# Altium integrated library Huan_basic.IntLib: 113 symbols
Pins are listed as number, name and electrical type; pins without a type are passive.

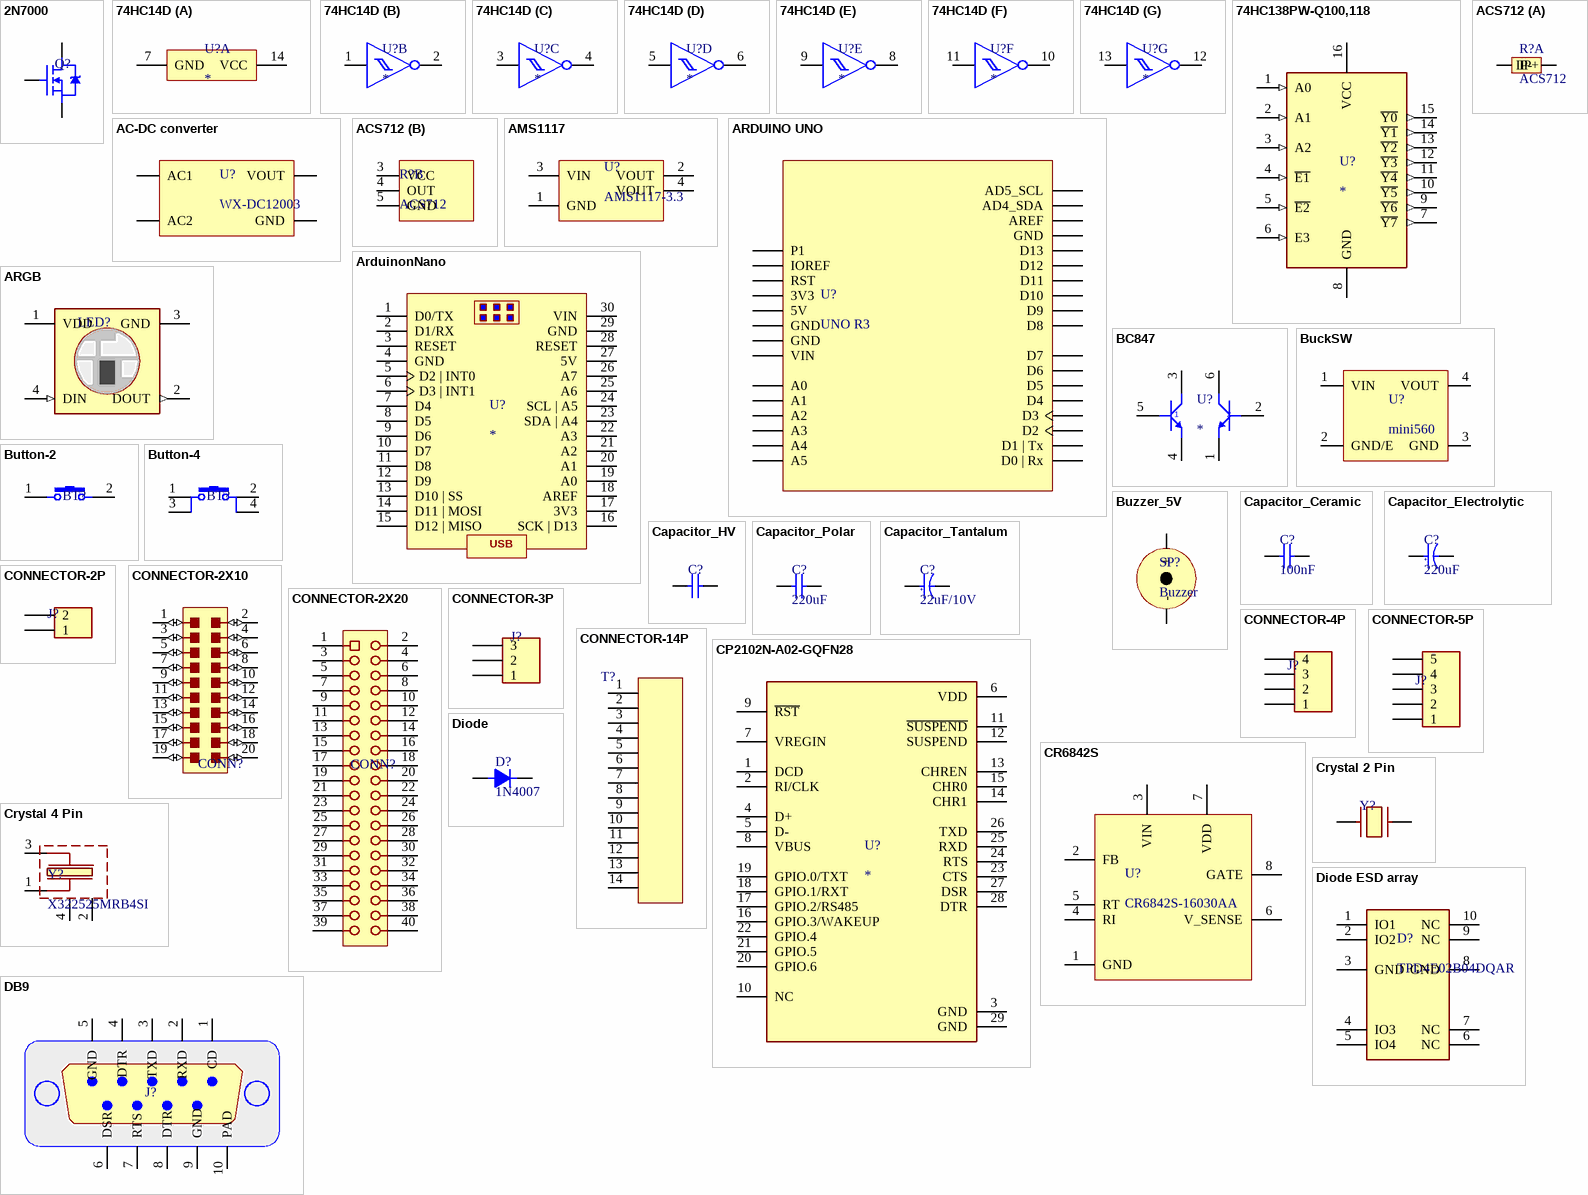
[diagram p0: symbols 2N7000 to Diode ESD array]

## 2N7000
designator Q?, comment Mosfet N Signal  (value not drawn)
footprint SOT-23
pins: 1 G, 2 D, 3 S

## 74HC14D
designator U?
Inverter IC 6 Channel Schmitt Trigger 14-SOIC; MF: Toshiba; MP: 74HC14D; SnapEDA_Link: https://www.snapeda.com/parts/74HC14D/Toshiba+Semiconductor+and+Storage/view-part/?ref=snap; Availability: In Stock; Price: None; Package: SO14-14 Nexperia USA Inc.; Purchase-URL: https://pricing.snapeda.com/search/part/74HC14D/?ref=eda; Check_prices: https://www.snapeda.com/parts/74HC14D/Toshiba+Semiconductor+and+Storage/view-part/?ref=eda; Value: *
footprint SO14
part A pins: 7 GND, 14 VCC (power)
part B pins: 1 1A (power), 2 1Y (power)
part C pins: 3 2A (power), 4 2Y (power)
part D pins: 5 3A (power), 6 3Y (power)
part E pins: 8 4Y (power), 9 4A (power)
part F pins: 10 5Y (power), 11 5A (power)
part G pins: 12 6Y (power), 13 6A (power)

## 74HC138PW-Q100,118
designator U?
Decoder/Demultiplexer 1 x 3:8 16-TSSOP; MF: Nexperia USA; MP: 74HC138PW-Q100,118; SnapEDA_Link: https://www.snapeda.com/parts/74HC138PW-Q100,118/Nexperia/view-part/?ref=snap; Package: TSSOP16-16 Nexperia USA Inc.; Value: *; Check_prices: https://www.snapeda.com/parts/74HC138PW-Q100,118/Nexperia/view-part/?ref=eda
footprint TSSOP-20
pins: 1 A0 (in), 2 A1 (in), 3 A2 (in), 4 ~{E1} (in), 5 ~{E2} (in), 6 E3 (in), 7 ~{Y7} (out), 8 GND (power), 9 ~{Y6} (out), 10 ~{Y5} (out), 11 ~{Y4} (out), 12 ~{Y3} (out), 13 ~{Y2} (out), 14 ~{Y1} (out), 15 ~{Y0} (out), 16 VCC (power)

## AC-DC converter
designator U?, comment WX-DC12003
footprint WX-DC12003
pins: 1 AC1, 2 AC2, 3 GND, 4 VOUT

## ACS712
designator R?
footprint ACS712
part A pins: 1 IP+, 2 IP-
part B pins: 3 VCC, 4 OUT, 5 GND

## AMS1117
designator U?, comment AMS1117-3.3
footprint SOT223
pins: 1 GND, 2 VOUT, 3 VIN, 4 VOUT

## ARDUINO UNO
designator U?, comment UNO R3
Microcontroller board based on the ATmega328P.; MF: Arduino; MP: ARDUINO UNO REV3; SnapEDA_Link: https://www.snapeda.com/parts/ARDUINO%20UNO%20REV3/Arduino/view-part/?ref=snap; Package: Non-Standard Arduino; Value: *; Check_prices: https://www.snapeda.com/parts/ARDUINO%20UNO%20REV3/Arduino/view-part/?ref=eda
footprint ARDUINO_ARDUINO_UNO_REV3
pins: 3V3 (power), 5V (power), A0 (power), A1 (power), A2 (power), A3 (power), A4 (power), A4_SDA AD4_SDA (power), A5 (power), A5_SCL AD5_SCL (power), AREF (power), D0 D0 | Rx (power), D1 D1 | Tx (power), D2 (power), D3 (power), D4 (power), D5 (power), D6 (power), D7 (power), D8 (power), D9 (power), D10 (power), D11 (power), D12 (power), D13 (power), GND_1 GND (power), GND_2 GND (power), GND_3 GND (power), IOREF (power), P1 (power), RST (power), VIN (power)

## ArduinonNano
designator U?
Small, complete, and breadboard-friendly board based on the ATmega328 (Arduino Nano 3.x).; MP: A000005; Check_prices: https://www.snapeda.com/parts/A000005/Arduino/view-part/?ref=eda; Value: *; Availability: In Stock; Price: None; Package: Non-Standard Arduino; SnapEDA_Link: https://www.snapeda.com/parts/A000005/Arduino/view-part/?ref=snap; Purchase-URL: https://pricing.snapeda.com/search/part/A000005/?ref=eda; MF: Arduino
footprint ARDUINO-NANO
pins: 1 D0/TX (power), 2 D1/RX (power), 3 RESET (power), 4 GND (power), 5 D2 | INT0 (power), 6 D3 | INT1 (oc), 7 D4 (power), 8 D5 (oc), 9 D6 (oc), 10 D7 (power), 11 D8 (power), 12 D9 (oc), 13 D10 | SS (oc), 14 D11 | MOSI (oc), 15 D12 | MISO (power), 16 SCK | D13 (power), 17 3V3 (power), 18 AREF (power), 19 A0 (power), 20 A1 (power), 21 A2 (power), 22 A3 (power), 23 SDA | A4 (power), 24 SCL | A5 (power), 25 A6 (power), 26 A7 (power), 27 5V (power), 28 RESET (power), 29 GND (power), 30 VIN (power)
text: USB

## ARGB
designator LED?  (value not drawn)
5050 symphony LED SMD; MF: Xinglight; MP: XL-5050RGBC-WS2812B; SnapEDA_Link: https://www.snapeda.com/parts/XL-5050RGBC-WS2812B/Xinglight/view-part/?ref=snap; Package: Package; Value: *; Check_prices: https://www.snapeda.com/parts/XL-5050RGBC-WS2812B/Xinglight/view-part/?ref=eda
footprint WS2812-5050
footprint sk6805
pins: 1 VDD (power), 2 DOUT (out), 3 GND (power), 4 DIN (in)

## BC847
designator U?
Bipolar (BJT) Transistor Array 2 NPN (Dual) 45V 100mA 100MHz 380mW Surface Mount SC-88/SC70-6/SOT-363; MF: onsemi; MP: BC847BDW1T1G; SnapEDA_Link: https://www.snapeda.com/parts/BC847BDW1T1G/Onsemi/view-part/?ref=snap; Package: SC-88-6 ON Semiconductor; Value: *; Check_prices: https://www.snapeda.com/parts/BC847BDW1T1G/Onsemi/view-part/?ref=eda
footprint SOT-363
pins: 1, 2, 3, 4, 5, 6

## BuckSW
designator U?, comment mini560
footprint BUCK-20V-3A
footprint mini560
pins: 1 VIN, 2 GND/E, 3 GND, 4 VOUT

## Button-2
designator BT?
footprint SW_B3U-1000PM
pins: 1, 2

## Button-4
designator BT?
footprint BUTTON-12X12MM
footprint BUTTON 6X6 SMD
pins: 1, 2, 3, 4

## Buzzer_5V
designator SP?, comment Buzzer
footprint Buzzer
pins: 1 +, 2 -

## Capacitor_Ceramic
designator C?, comment 100nF
footprint C0603
footprint C1206
footprint C0805
footprint C1812
footprint C0402
footprint C1210
pins: 1, 2

## Capacitor_Electrolytic
designator C?, comment 220uF
footprint CAP-TH-6.3MM
footprint CAP-TH-8MM
footprint CAP-TH-10MM
footprint CAP-SMD-6.3MM
footprint CAP-SMD-8MM
footprint CAP-SMD-10MM
footprint CAP-TH-16MM
footprint C2917
pins: 1, 2
text: +

## Capacitor_HV
designator C?  (value not drawn)
footprint CAP-HV
pins: 1, 2

## Capacitor_Polar
designator C?, comment 220uF
footprint cbb21
pins: 1, 2

## Capacitor_Tantalum
designator C?, comment 22uF/10V
MF: KYOCERA AVX; MP: TAJA106K016RNJ; SnapEDA_Link: https://www.snapeda.com/parts/TAJA106K016RNJ/Kyocera/view-part/?ref=snap; Package: Package; Value: *; Check_prices: https://www.snapeda.com/parts/TAJA106K016RNJ/Kyocera/view-part/?ref=eda
footprint C1206P
footprint C2917
pins: 1, 2
text: +

## CONNECTOR-2P
designator J?
footprint KF5.08-2P
footprint TERMINAL-7.62-2
footprint TERMINAL-5.08-2
footprint KF762MM
footprint JST_S2B-PH-SM4-TB(LF)(SN)
pins: 1, 2

## CONNECTOR-2X10
designator CONN?
footprint 2.54 2x10
pins: 1 (io), 2 (io), 3 (io), 4 (io), 5 (io), 6 (io), 7 (io), 8 (io), 9 (io), 10 (io), 11 (io), 12 (io), 13 (io), 14 (io), 15 (io), 16 (io), 17 (io), 18 (io), 19 (io), 20 (io)

## CONNECTOR-2X20
designator CONN?
footprint 2.54 2x20
pins: 1 (power), 2 (power), 3 (power), 4 (power), 5 (power), 6 (power), 7 (power), 8 (power), 9 (power), 10 (power), 11 (power), 12 (power), 13 (power), 14 (power), 15 (power), 16 (power), 17 (power), 18 (power), 19 (power), 20 (power), 21 (power), 22 (power), 23 (power), 24 (power), 25 (power), 26 (power), 27 (power), 28 (power), 29 (power), 30 (power), 31 (power), 32 (power), 33 (power), 34 (power), 35 (power), 36 (power), 37 (power), 38 (power), 39 (power), 40 (power)

## CONNECTOR-3P
designator J?  (value not drawn)
footprint KF5.08-3p
footprint XH-2.54-3-V
footprint ED5.08-3P
footprint TERMINAL-7.62-3
pins: 1, 2, 3

## CONNECTOR-4P
designator J?
footprint XH-2.54-4-R
footprint CH-3.96-4-V
footprint XH-2.54-4P
pins: 1, 2, 3, 4

## CONNECTOR-5P
designator J?
footprint XH-2.54-5-R
footprint HB9500
pins: 1, 2, 3, 4, 5

## CONNECTOR-14P
designator T?
footprint DG141-14P
pins: 1 (power), 2 (power), 3 (power), 4 (power), 5 (power), 6 (power), 7 (power), 8 (power), 9 (power), 10 (power), 11 (power), 12 (power), 13 (power), 14 (power)

## CP2102N-A02-GQFN28
designator U?
USB TO UART BRIDGE, -40 TO 85DEG C; Bridge Type:USB to UART; Supply Voltage Min:3V; Supply Voltage Max:3.6V; Interface Case Style:QFN; No. of Pins:28Pins; Operating Temperature Min:-40Â°C; Operating Temperature Max:85Â°C; Product Range:-; Automotive Quali; MF: Silicon Labs; MP: CP2102NA02GQFN28; SnapEDA_Link: https://www.snapeda.com/parts/CP2102NA02GQFN28/Silicon+Labs/view-part/?ref=snap; Package: None; Value: *; Check_prices: https://www.snapeda.com/parts/CP2102NA02GQFN28/Silicon+Labs/view-part/?ref=eda
footprint QFN-28
pins: 1 DCD (power), 2 RI/CLK (power), 3 GND (power), 4 D+ (power), 5 D- (power), 6 VDD (power), 7 VREGIN (power), 8 VBUS (power), 9 ~{RST} (power), 10 NC (power), 11 ~{SUSPEND} (power), 12 SUSPEND (power), 13 CHREN (power), 14 CHR1 (power), 15 CHR0 (power), 16 GPIO.3/WAKEUP (power), 17 GPIO.2/RS485 (power), 18 GPIO.1/RXT (power), 19 GPIO.0/TXT (power), 20 GPIO.6 (power), 21 GPIO.5 (power), 22 GPIO.4 (power), 23 CTS (power), 24 RTS (power), 25 RXD (power), 26 TXD (power), 27 DSR (power), 28 DTR (power), 29 GND (power)

## CR6842S
designator U?, comment CR6842S-16030AA
footprint SOP-8
pins: 1 GND, 2 FB, 3 VIN, 4 RI, 5 RT, 6 V_SENSE, 7 VDD, 8 GATE

## Crystal 2 Pin
designator Y?, comment 32.768kHz  (value not drawn)
LOW FREQUENCY CRYSTAL; MF: Micro Crystal; MP: CM7V-T1A-LOW-ESR-32.768KHZ-12.5PF-20-TA-QC; Package: SMD-2 Micro Crystal; Value: *; Check_prices: https://www.snapeda.com/parts/CM7V-T1A-LOW-ESR-32.768KHZ-12.5PF-20-TA-QC/Micro+Crystal/view-part/?ref=eda; SnapEDA_Link: https://www.snapeda.com/parts/CM7V-T1A-LOW-ESR-32.768KHZ-12.5PF-20-TA-QC/Micro+Crystal/view-part/?ref=snap; Availability: In Stock; Purchase-URL: https://pricing.snapeda.com/search/part/CM7V-T1A-LOW-ESR-32.768KHZ-12.5PF-20-TA-QC/?ref=eda; Price: None
footprint XTAL 2P 3215
pins: 1, 2

## Crystal 4 Pin
designator Y?, comment X322525MRB4SI
25 MHz ±10ppm Crystal 18pF 40 Ohms 4-SMD, No Lead; MP: TSX-3225 25.0000MF10P-C0; MF: EPSON; Purchase-URL: https://pricing.snapeda.com/search/part/TSX-3225 25.0000MF10P-C0/?ref=eda; Package: SMD-4 EPSON; Value: *; Availability: In Stock; Price: None; SnapEDA_Link: https://www.snapeda.com/parts/TSX-3225%2025.0000MF10P-C0/EPSON/view-part/?ref=snap; Check_prices: https://www.snapeda.com/parts/TSX-3225%2025.0000MF10P-C0/EPSON/view-part/?ref=eda
footprint XTAL 4P 3225
pins: 1, 2 GND (power), 3 2, 4 GND (power)

## DB9
designator J?, comment DB9 connector  (value not drawn)
footprint DB9
pins: 1 CD, 2 RXD, 3 TXD, 4 DTR, 5 GND, 6 DSR, 7 RTS, 8 DTR, 9 GND, 10 PAD

## Diode
designator D?, comment 1N4007
footprint SOD-123F
footprint LL-34(MiniMELF)
footprint DO-214AC(SMA)
footprint DO-214AB(SMC)
footprint DO-41-plastic_Vertical
footprint R-6
footprint DO-2A
footprint SOD-123
footprint SOD-323
footprint DO-41-plastic
pins: 1 A, 2 K

## Diode ESD array
designator D?, comment TPD4E02B04DQAR
4-channel ESD protection diode for USB Type-C and HDMI 2.0 10-USON -40 to 125; MF: Texas Instruments; Value: *; MP: TPD4E02B04DQAR; Package: USON-10 Texas Instruments; Purchase-URL: https://pricing.snapeda.com/search/part/TPD4E02B04DQAR/?ref=eda; SnapEDA_Link: https://www.snapeda.com/parts/TPD4E02B04DQAR/Texas%20Instruments/view-part/576424/?ref=snap; Check_prices: https://www.snapeda.com/parts/TPD4E02B04DQAR/Texas%20Instruments/view-part/576424/?ref=eda; Digi-Key_Part_Number: 296-43875-1-ND
footprint USON-10
pins: 1 IO1 (power), 2 IO2 (power), 3 GND (power), 4 IO3 (power), 5 IO4 (power), 6 NC, 7 NC, 8 GND (power), 9 NC, 10 NC

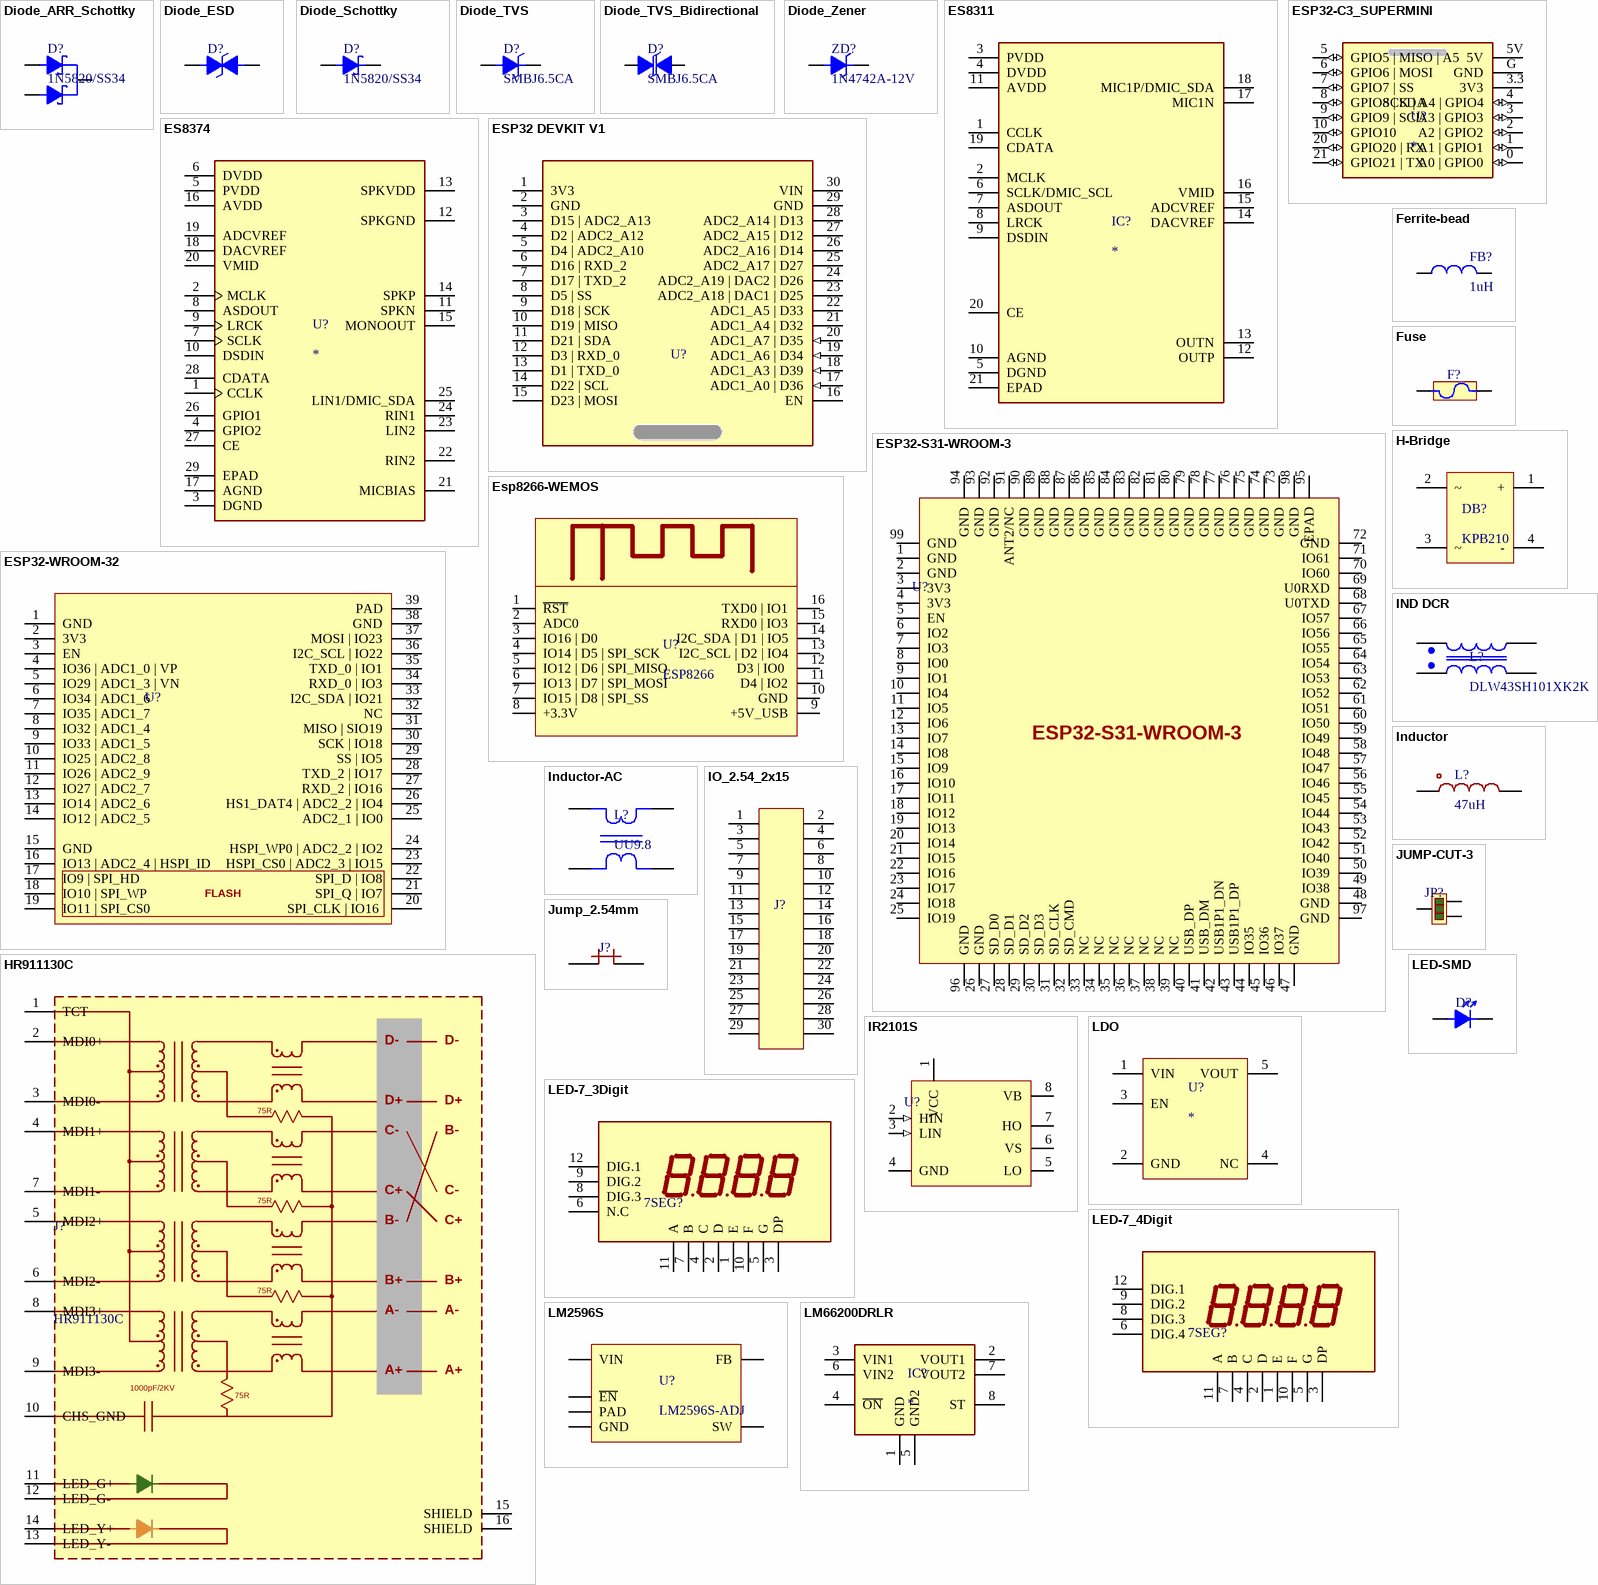
[diagram p1: symbols Diode_ARR_Schottky to LM66200DRLR]

## Diode_ARR_Schottky
designator D?, comment 1N5820/SS34
footprint TO-252-2
pins: 1 A, 2 K, 3 A

## Diode_ESD
designator D?
footprint SOD-523
pins: 1 A, 2 K

## Diode_Schottky
designator D?, comment 1N5820/SS34
footprint SOD-123F
footprint DO-214AC(SMA)
footprint DO-214AB(SMC)
footprint DO-214AA(SMB)
pins: 1 A, 2 K

## Diode_TVS
designator D?, comment SMBJ6.5CA
footprint DO-214AC(SMA)
footprint DO-214AB(SMC)
footprint SOD-323
footprint SOD-123
footprint SOD-523
footprint DO-214AA(SMB)
pins: 1 A, 2 K

## Diode_TVS_Bidirectional
designator D?, comment SMBJ6.5CA
footprint DO-214AC(SMA)
footprint DO-214AB(SMC)
footprint SOD-323
footprint DO-214AA(SMB)
pins: 1 A, 2 K

## Diode_Zener
designator ZD?, comment 1N4742A-12V
footprint SOD-123F
footprint LL-34(MiniMELF)
footprint DO-41-glass
pins: 1 A, 2 K

## ES8311
designator IC?
Low Power Mono Audio CODEC; MF: Everest Semiconductor; MP: ES8311; SnapEDA_Link: https://www.snapeda.com/parts/ES8311/Everest+Semiconductor/view-part/?ref=snap; Package: Package; Value: *; Check_prices: https://www.snapeda.com/parts/ES8311/Everest+Semiconductor/view-part/?ref=eda
footprint QFN-20
pins: 1 CCLK (power), 2 MCLK (power), 3 PVDD (power), 4 DVDD (power), 5 DGND (power), 6 SCLK/DMIC_SCL (power), 7 ASDOUT (power), 8 LRCK (power), 9 DSDIN (power), 10 AGND (power), 11 AVDD (power), 12 OUTP (power), 13 OUTN (power), 14 DACVREF (power), 15 ADCVREF (power), 16 VMID (power), 17 MIC1N (power), 18 MIC1P/DMIC_SDA (power), 19 CDATA (power), 20 CE (power), 21 EPAD (power)

## ES8374
designator U?
Low Power Mono Audio CODEC. 24-bit, 8 to 96 kHz sampling frequency, 95 dB signal to noise ratio.; MF: Everest Semiconductor; MP: ES8374; SnapEDA_Link: https://www.snapeda.com/parts/ES8374/Everest+Semiconductor/view-part/?ref=snap; Package: None; Value: *; Check_prices: https://www.snapeda.com/parts/ES8374/Everest+Semiconductor/view-part/?ref=eda
footprint QFN-28
pins: 1 CCLK (power), 2 MCLK (power), 3 DGND (power), 4 GPIO2 (power), 5 PVDD (power), 6 DVDD (power), 7 SCLK (power), 8 ASDOUT (power), 9 LRCK (power), 10 DSDIN (power), 11 SPKN (power), 12 SPKGND (power), 13 SPKVDD (power), 14 SPKP (power), 15 MONOOUT (power), 16 AVDD (power), 17 AGND (power), 18 DACVREF (power), 19 ADCVREF (power), 20 VMID (power), 21 MICBIAS (power), 22 RIN2 (power), 23 LIN2 (power), 24 RIN1 (power), 25 LIN1/DMIC_SDA (power), 26 GPIO1 (power), 27 CE (power), 28 CDATA (power), 29 EPAD (power)

## ESP32 DEVKIT V1
designator U?  (value not drawn)
The DOIT ESP32 DevKit V1 is probably the most famous development board based on the equally popular ESP32 Wi-Fi SoC from Espressif. In fact, the DevKit V1 is more popular than any official board from Espressif.
footprint ESP32 DEVKIT V1
pins: 1 3V3, 2 GND, 3 D15 | ADC2_A13, 4 D2 | ADC2_A12, 5 D4 | ADC2_A10, 6 D16 | RXD_2, 7 D17 | TXD_2, 8 D5 | SS, 9 D18 | SCK, 10 D19 | MISO, 11 D21 | SDA, 12 D3 | RXD_0, 13 D1 | TXD_0, 14 D22 | SCL, 15 D23 | MOSI, 16 EN, 17 ADC1_A0 | D36 (in), 18 ADC1_A3 | D39 (in), 19 ADC1_A6 | D34 (in), 20 ADC1_A7 | D35 (in), 21 ADC1_A4 | D32, 22 ADC1_A5 | D33, 23 ADC2_A18 | DAC1 | D25, 24 ADC2_A19 | DAC2 | D26, 25 ADC2_A17 | D27, 26 ADC2_A16 | D14, 27 ADC2_A15 | D12, 28 ADC2_A14 | D13, 29 GND, 30 VIN

## ESP32-C3_SUPERMINI
designator U?
Super tiny ESP32-C3 board; MF: Espressif Systems; MP: ESP32-C3 SuperMini_TH; SnapEDA_Link: https://www.snapeda.com/parts/ESP32-C3%20SuperMini_TH/Espressif+Systems/view-part/?ref=snap; Package: Package; Value: *; Check_prices: https://www.snapeda.com/parts/ESP32-C3%20SuperMini_TH/Espressif+Systems/view-part/?ref=eda
footprint MODULE_ESP32-C3_SUPERMINI
pins: 0 A0 | GPIO0 (io), 1 A1 | GPIO1 (io), 2 A2 | GPIO2 (io), 3 A3 | GPIO3 (io), 3.3 3V3 (power), 4 SCK | A4 | GPIO4 (io), 5 GPIO5 | MISO | A5 (io), 5V (power), 6 GPIO6 | MOSI (io), 7 GPIO7 | SS (io), 8 GPIO8 | SDA (io), 9 GPIO9 | SCL (io), 10 GPIO10 (io), 20 GPIO20 | RX (io), 21 GPIO21 | TX (io), G GND (power)

## ESP32-S31-WROOM-3
designator U?  (value not drawn)
footprint ESP32-S31-WROOM-3
pins: 1 GND (power), 2 GND (power), 3 3V3 (power), 4 3V3 (power), 5 EN (power), 6 IO2 (power), 7 IO3 (power), 8 IO0 (power), 9 IO1 (power), 10 IO4 (power), 11 IO5 (power), 12 IO6 (power), 13 IO7 (power), 14 IO8 (power), 15 IO9 (power), 16 IO10 (power), 17 IO11 (power), 18 IO12 (power), 19 IO13 (power), 20 IO14 (power), 21 IO15 (power), 22 IO16 (power), 23 IO17 (power), 24 IO18 (power), 25 IO19 (power), 26 GND (power), 27 SD_D0 (power), 28 SD_D1 (power), 29 SD_D2 (power), 30 SD_D3 (power), 31 SD_CLK (power), 32 SD_CMD (power), 33 NC (power), 34 NC (power), 35 NC (power), 36 NC (power), 37 NC (power), 38 NC (power), 39 NC (power), 40 USB_DP (power), 41 USB_DM (power), 42 USB1P1_DN (power), 43 USB1P1_DP (power), 44 IO35 (power), 45 IO36 (power), 46 IO37 (power), 47 GND (power), 48 GND (power), 49 IO38 (power), 50 IO39 (power), 51 IO40 (power), 52 IO42 (power), 53 IO43 (power), 54 IO44 (power), 55 IO45 (power), 56 IO46 (power), 57 IO47 (power), 58 IO48 (power), 59 IO49 (power), 60 IO50 (power), 61 IO51 (power), 62 IO52 (power), 63 IO53 (power), 64 IO54 (power), 65 IO55 (power), 66 IO56 (power), 67 IO57 (power), 68 U0TXD (power), 69 U0RXD (power), 70 IO60 (power), 71 IO61 (power), 72 GND (power), 73 GND (power), 74 GND (power), 75 GND (power), 76 GND (power), 77 GND (power), 78 GND (power), 79 GND (power), 80 GND (power), 81 GND (power), 82 GND (power), 83 GND (power), 84 GND (power), 85 GND (power), 86 GND (power), 87 GND (power), 88 GND (power), 89 GND (power), 90 GND (power), 91 ANT2/NC (power), 92 GND (power), 93 GND (power), 94 GND (power), 95 EPAD (power), 96 GND (power), 97 GND (power), 98 GND (power), 99 GND (power)

## ESP32-WROOM-32
designator U?
MF: {'manufacturer': u'Espressif Systems'}; MP: ESP32-S3-WROOM-1U-N4R2; Package: None; Price: None; Value: *; Availability: Unavailable
footprint ESP32-VWROOM-32
pins: 1 GND (power), 2 3V3 (power), 3 EN (power), 4 IO36 | ADC1_0 | VP (power), 5 IO29 | ADC1_3 | VN (power), 6 IO34 | ADC1_6 (power), 7 IO35 | ADC1_7 (power), 8 IO32 | ADC1_4 (power), 9 IO33 | ADC1_5 (power), 10 IO25 | ADC2_8 (power), 11 IO26 | ADC2_9 (power), 12 IO27 | ADC2_7 (power), 13 IO14 | ADC2_6 (power), 14 IO12 | ADC2_5 (power), 15 GND (power), 16 IO13 | ADC2_4 | HSPI_ID (power), 17 IO9 | SPI_HD (power), 18 IO10 | SPI_WP (power), 19 IO11 | SPI_CS0 (power), 20 SPI_CLK | IO16  (power), 21 SPI_Q | IO7 (power), 22 SPI_D | IO8 (power), 23 HSPI_CS0 | ADC2_3 | IO15 (power), 24 HSPI_WP0 | ADC2_2 | IO2 (power), 25  ADC2_1 | IO0 (power), 26 HS1_DAT4 | ADC2_2 | IO4 (power), 27 RXD_2 | IO16 (power), 28 TXD_2 | IO17 (power), 29 SS | IO5 (power), 30 SCK | IO18 (power), 31 MISO | SIO19 (power), 32 NC (power), 33 I2C_SDA | IO21 (power), 34 RXD_0 | IO3 (power), 35 TXD_0 | IO1 (power), 36 I2C_SCL | IO22 (power), 37 MOSI | IO23 (power), 38 GND (power), 39 PAD (power)
text: FLASH

## Esp8266-WEMOS
designator U?, comment ESP8266
footprint WEMOS-D1-MINI
pins: 1 ~{RST}, 2 ADC0, 3 IO16 | D0, 4 IO14 | D5 | SPI_SCK, 5 IO12 | D6 | SPI_MISO, 6 IO13 | D7 | SPI_MOSI, 7 IO15 | D8 | SPI_SS, 8 +3.3V, 9 +5V_USB, 10 GND, 11 D4 | IO2, 12 D3 | IO0 , 13 I2C_SCL | D2 | IO4, 14 I2C_SDA | D1 | IO5, 15 RXD0 | IO3, 16 TXD0 | IO1

## Ferrite-bead
designator FB?, comment 1uH
footprint L0805
footprint L0603
pins: 1, 2

## Fuse
designator F?, comment 6V/2A  (value not drawn)
footprint F2920
footprint FUSE-TH-5*20
footprint FUSE-3.15A-250V
footprint F1206
pins: 1, 2

## H-Bridge
designator DB?, comment KPB210
footprint KBP210
footprint ABS210
pins: 1 +, 2 ~, 3 ~, 4 -

## HR911130C
designator J?
SINGLE PORT RJ45 CONNECTOR WITH INTEGRATED MAGNETICS AND LED; Manufacturer_Name: Hanrun Electronics; Geometry.Height: 15mm; Manufacturer_Part_Number: HR911130C; Mouser Part Number: *; Mouser Price/Stock: *; Arrow Part Number: *; Arrow Price/Stock: *; Datasheet Link: http://www.cecb2b.com/batchupload/inventoryother/zfa_ic_inventory/2011121/zfa__204559_a7c3c0b2f5d8a53eec456bb4b34ade89.PDF
footprint HR911130C
pins: 1 TCT, 2 MDI0+, 3 MDI0-, 4 MDI1+, 5 MDI2+, 6 MDI2-, 7 MDI1-, 8 MDI3+, 9 MDI3-, 10 CHS_GND, 11 LED_G+, 12 LED_G-, 13 LED_Y-, 14 LED_Y+, 15 SHIELD, 16 SHIELD
text: D-; D+; 75R; C-; B-; C+; B+; A-; A+; 1000pF/2KV

## IND DCR
designator L?, comment DLW43SH101XK2K
Ind Common Mode Choke Wirewound 100uH -30% to 50% 1MHz 200mA 1812 Embossed Plastic T/R; MF: Murata; Package: 1812 Murata; Value: *; Availability: Unavailable; SnapEDA_Link: https://www.snapeda.com/parts/DLW43SH101XK2K/Murata/view-part/589643/?ref=snap; MP: DLW43SH101XK2K; Price: None
footprint SMD-4 1812
pins: 1, 2, 3, 4

## Inductor
designator L?, comment 47uH
footprint CDRH127-XXX_12*12*8MM
footprint INDUCTOR-TH-8mm
footprint AMPLF-1055
footprint PNR3015
footprint INDC2520X100N
footprint IND_ASPI-0530HI-2R2M-T2
footprint L1054
footprint L0650
footprint L0603
footprint L0805
footprint L0603 HF
pins: 1, 2

## Inductor-AC
designator L?, comment UU9.8
footprint UU9.8-7X8MM
pins: 1, 2, 3, 4

## IO_2.54_2x15
designator J?
footprint XH2.54-2X15
pins: 1 (power), 2 (power), 3 (power), 4 (power), 5 (power), 6 (power), 7 (power), 8 (power), 9 (power), 10 (power), 11 (power), 12 (power), 13 (power), 14 (power), 15 (power), 16 (power), 17 (power), 18 (power), 19 (power), 20 (power), 21 (power), 22 (power), 23 (power), 24 (power), 25 (power), 26 (power), 27 (power), 28 (power), 29 (power), 30 (power)

## IR2101S
designator U?
footprint SOP-8
pins: 1 VCC, 2 HIN (in), 3 LIN (in), 4 GND, 5 LO, 6 VS, 7 HO, 8 VB

## JUMP-CUT-3
designator JP?, comment JUMP  (value not drawn)
footprint JUMP-CUT
pins: 1, 2, 3

## Jump_2.54mm
designator J?  (value not drawn)
footprint 2.54 2X1
pins: 1, 2

## LDO
designator U?
JSMSEMI RT9193-33GB-JSM
footprint SOT23-5
pins: 1 VIN, 2 GND, 3 EN, 4 NC, 5 VOUT

## LED-7_3Digit
designator 7SEG?  (value not drawn)
Digit 7 Segment Display; MF: Ningbo Flying Electronics; MP: NFD-3641AH-11; Package: Package; Price: None; Value: *; SnapEDA_Link: https://www.snapeda.com/parts/NFD-3641AH-11/Ningbo+Flying+Electronics/view-part/?ref=snap; Availability: Not in stock; Check_prices: https://www.snapeda.com/parts/NFD-3641AH-11/Ningbo+Flying+Electronics/view-part/?ref=eda
footprint LED-5361
pins: 1 E, 2 D, 3 DP, 4 C, 5 G, 6 N.C, 7 B, 8 DIG.3, 9 DIG.2, 10 F, 11 A, 12 DIG.1

## LED-7_4Digit
designator 7SEG?  (value not drawn)
0.36(9.20mm)Four Digit 7 Segment Display; MF: Ningbo Flying Electronics; MP: NFD-3641AH-11; Package: Package; Price: None; Value: *; SnapEDA_Link: https://www.snapeda.com/parts/NFD-3641AH-11/Ningbo+Flying+Electronics/view-part/?ref=snap; Availability: Not in stock; Check_prices: https://www.snapeda.com/parts/NFD-3641AH-11/Ningbo+Flying+Electronics/view-part/?ref=eda
footprint LED-3641A
pins: 1 E, 2 D, 3 DP, 4 C, 5 G, 6 DIG.4, 7 B, 8 DIG.3, 9 DIG.2, 10 F, 11 A, 12 DIG.1

## LED-SMD
designator D?
footprint LED0603
footprint LED0805
pins: 1, 2

## LM2596S
designator U?, comment LM2596S-ADJ
footprint TO-263-5
pins: 1 VIN, 2 SW, 3 GND, 4 FB, 5 ~{EN}, 6 PAD

## LM66200DRLR
designator IC?
1.6-V to 5.5-V, 40-mâ„¦, 2.5-A, low-IQ, dual ideal diode; MF: Texas Instruments; MP: LM66200DRLR; SnapEDA_Link: https://www.snapeda.com/parts/LM66200DRLR/Texas+Instruments/view-part/?ref=snap; Package: None; Value: *; Check_prices: https://www.snapeda.com/parts/LM66200DRLR/Texas+Instruments/view-part/?ref=eda
footprint SOT8
pins: 1 GND, 2 VOUT1, 3 VIN1, 4 ~{ON}, 5 GND2, 6 VIN2, 7 VOUT2, 8 ST

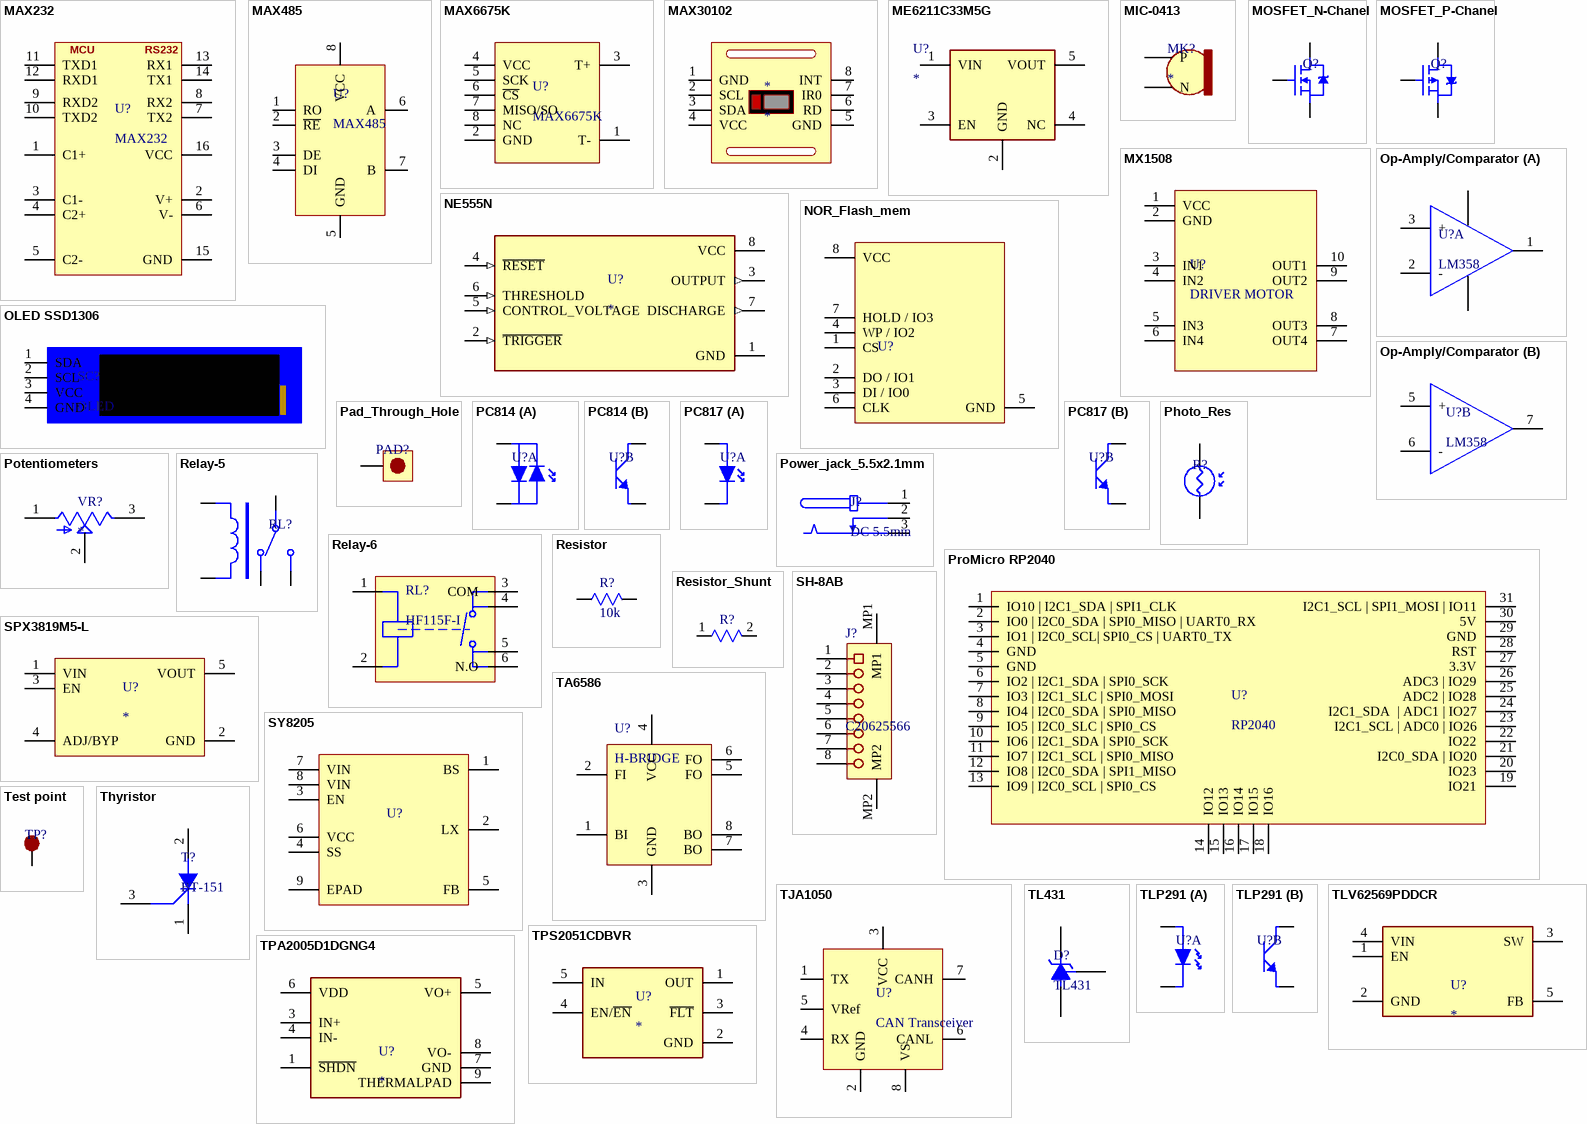
[diagram p2: symbols MAX232 to TPS2051CDBVR]

## MAX232
designator U?
footprint SOP-16
footprint DIP-16
pins: 1 C1+, 2 V+, 3 C1-, 4 C2+, 5 C2-, 6 V-, 7 TX2, 8 RX2, 9 RXD2, 10 TXD2, 11 TXD1, 12 RXD1, 13 RX1, 14 TX1, 15 GND, 16 VCC
text: MCU; RS232

## MAX485
designator U?
footprint SOP-8
pins: 1 RO, 2 ~{RE}, 3 DE, 4 DI, 5 GND, 6 A, 7 B, 8 VCC

## MAX6675K
designator U?
Thermal coupler
footprint SOP-8
pins: 1 T-, 2 GND, 3 T+, 4 VCC, 5 SCK, 6 ~{CS}, 7 MISO/SO, 8 NC

## MAX30102
designator *
footprint MAX30102-MODULE
pins: 1 GND, 2 SCL, 3 SDA, 4 VCC, 5 GND, 6 RD, 7 IR0, 8 INT

## ME6211C33M5G
designator U?
MF: Microne; MP: ME6211C33M5G; SnapEDA_Link: https://www.snapeda.com/parts/ME6211C33M5G/Microne/view-part/?ref=snap; Package: None; Value: *; Check_prices: https://www.snapeda.com/parts/ME6211C33M5G/Microne/view-part/?ref=eda
footprint SOT23-5
pins: 1 VIN (power), 2 GND (power), 3 EN (power), 4 NC (power), 5 VOUT (power)

## MIC-0413
designator MK?
4.0 mm, Omnidirectional, Surface Mount, 2.0 Vdc, Electret Condenser Microphone; MF: Same Sky; MP: CMEJ-0413-42-SMT-TR; SnapEDA_Link: https://www.snapeda.com/parts/CMEJ-0413-42-SMT-TR/Same+Sky/view-part/?ref=snap; Package: CUI Inc.; Value: *; Check_prices: https://www.snapeda.com/parts/CMEJ-0413-42-SMT-TR/Same+Sky/view-part/?ref=eda
footprint MIC_CMEJ-0413-42-SMT-TR
pins: 1 P, 2 N

## MOSFET_N-Chanel
designator Q?
footprint TO-252-2
footprint TO-220
pins: 1 G, 2 D, 3 S

## MOSFET_P-Chanel
designator Q?
footprint TO-252-2
footprint TO-220
pins: 1 G, 2 D, 3 S

## MX1508
designator U?, comment DRIVER MOTOR
footprint MX1508
pins: 1 VCC, 2 GND, 3 IN1, 4 IN2, 5 IN3, 6 IN4, 7 OUT4, 8 OUT3, 9 OUT2, 10 OUT1

## NE555N
designator U?
General Purpose Timer; MF: TAEJIN; MP: NE555N; SnapEDA_Link: https://www.snapeda.com/parts/NE555N/TAEJIN/view-part/?ref=snap; Package: Package; Value: *; Check_prices: https://www.snapeda.com/parts/NE555N/TAEJIN/view-part/?ref=eda
footprint DIP-8
pins: 1 GND (power), 2 ~{TRIGGER} (in), 3 OUTPUT (out), 4 ~{RESET} (in), 5 CONTROL_VOLTAGE (in), 6 THRESHOLD (in), 7 DISCHARGE (out), 8 VCC (power)

## NOR_Flash_mem
designator U?  (value not drawn)
footprint SOP-8
pins: 1 CS, 2 DO / IO1, 3 DI / IO0, 4 WP / IO2, 5 GND, 6 CLK, 7 HOLD / IO3, 8 VCC

## OLED SSD1306
designator SC?, comment OLED
footprint OLED 0.91 INCH 128X32
pins: 1 SDA, 2 SCL, 3 VCC, 4 GND

## Op-Amply/Comparator
designator U?, comment LM358
footprint SOP-8
footprint DIP-8
part A pins: 1, 2 -, 3 +, 4, 8
part B pins: 5 +, 6 -, 7

## Pad_Through_Hole
designator PAD?
footprint THROUGH_HOLE_MEDIUM
footprint THROUGH_HOLE_SMALL
pins: 1

## PC814
designator U?  (value not drawn)
footprint SMD-4
part A pins: 1 A, 2 K
part B pins: 3 E, 4 C

## PC817
designator U?  (value not drawn)
footprint SMD-4
footprint DIP-4
part A pins: 1 A, 2 K
part B pins: 3 E, 4 C

## Photo_Res
designator R?  (value not drawn)
footprint PHOTORESISTOR-5MM
pins: 1, 2

## Potentiometers
designator VR?
MF: Bourns; MP: 3362P-1-204; Price: None; SnapEDA_Link: https://www.snapeda.com/parts/3362P-1-204/Bourns/view-part/1483403/?ref=snap; Availability: Bad; Value: *; Purchase-URL: https://pricing.snapeda.com/search/part/3362P-1-204/?ref=eda; Check_prices: https://www.snapeda.com/parts/3362P-1-204/Bourns/view-part/1483403/?ref=eda; Package: 3362P-1 Bourns Inc.
footprint 3362P-1-204
footprint wh06
pins: 1 CCW, 2 WIPER, 3 CW

## Power_jack_5.5x2.1mm
designator J?, comment DC 5.5mm
footprint DC-5.5X2.1MM
pins: 1, 2, 3

## ProMicro RP2040
designator U?, comment RP2040
footprint RP2040-MICROPRO
pins: 1 IO10 | I2C1_SDA | SPI1_CLK (power), 2 IO0 | I2C0_SDA | SPI0_MISO | UART0_RX  (power), 3 IO1 | I2C0_SCL| SPI0_CS | UART0_TX  (power), 4 GND (power), 5 GND (power), 6 IO2 | I2C1_SDA | SPI0_SCK  (power), 7 IO3 | I2C1_SLC | SPI0_MOSI (power), 8 IO4 | I2C0_SDA | SPI0_MISO (power), 9 IO5 | I2C0_SLC | SPI0_CS (power), 10 IO6 | I2C1_SDA | SPI0_SCK (power), 11 IO7 | I2C1_SCL | SPI0_MISO (power), 12 IO8 | I2C0_SDA | SPI1_MISO (power), 13 IO9 | I2C0_SCL | SPI0_CS (power), 14 IO12 (power), 15 IO13 (power), 16 IO14 (power), 17 IO15 (power), 18 IO16 (power), 19 IO21 (power), 20 IO23 (power), 21 I2C0_SDA | IO20 (power), 22 IO22 (power), 23 I2C1_SCL | ADC0 | IO26 (power), 24 I2C1_SDA  | ADC1 | IO27 (power), 25 ADC2 | IO28 (power), 26 ADC3 | IO29 (power), 27 3.3V (power), 28 RST (power), 29 GND (power), 30 5V (power), 31 I2C1_SCL | SPI1_MOSI | IO11 (power)

## Relay-5
designator RL?
footprint SRD-05VDC-SL-C
pins: 1, 2, 3 COM, 4, 5

## Relay-6
designator RL?, comment HF115F-I
footprint HF115F-I
pins: 1, 2, 3 COM, 4, 5, 6 N.O

## Resistor
designator R?, comment 10k
footprint R0603
footprint R0805
footprint R1206
footprint RES_TH-1/4W
footprint R2512
footprint R0402
footprint RES_TH-2W
pins: 1, 2

## Resistor_Shunt
designator R?
footprint R0508
pins: 1, 2

## SH-8AB
designator J?, comment C20625566
Headers & Wire Housings 8 POS HDR VERT SMT; Manufacturer_Name: TE Connectivity; Manufacturer_Part_Number: 1734595-8; Geometry.Height: 5.05mm; Mouser Part Number: 571-1734595-8; Mouser Price/Stock: https://www.mouser.co.uk/ProductDetail/TE-Connectivity-AMP/1734595-8?qs=fvVej%2FMj3jcfM3nVGikCJQ%3D%3D; Arrow Part Number: 1734595-8; Arrow Price/Stock: https://www.arrow.com/en/products/1734595-8/te-connectivity; Datasheet Link: https://componentsearchengine.com/Datasheets/1/1734595-8.pdf
footprint SMD8P 1mm
pins: 1, 2, 3, 4, 5, 6, 7, 8, MP1, MP2

## SPX3819M5-L
designator U?
Linear Voltage Regulator IC Positive Adjustable 1 Output 500mA SOT-23-5; MF: MaxLinear, Inc.; MP: SPX3819M5-L/TR; SnapEDA_Link: https://www.snapeda.com/parts/SPX3819M5-L/TR/MaxLinear/view-part/?ref=snap; Package: SOT-23-5 Exar; Value: *; Check_prices: https://www.snapeda.com/parts/SPX3819M5-L/TR/MaxLinear/view-part/?ref=eda
footprint SOT23-5
pins: 1 VIN (power), 2 GND, 3 EN (power), 4 ADJ/BYP, 5 VOUT (power)

## SY8205
designator U?
BUCK
footprint SOP-8-PAD
pins: 1 BS, 2 LX, 3 EN, 4 SS, 5 FB, 6 VCC, 7 VIN, 8 VIN, 9 EPAD

## TA6586
designator U?, comment H-BRIDGE
footprint DIP-8
pins: 1 BI, 2 FI, 3 GND, 4 VCC, 5 FO, 6 FO, 7 BO, 8 BO

## Test point
designator TP?  (value not drawn)
footprint TP
pins: 1 EPAD

## Thyristor
designator T?, comment BT-151
footprint TO-220
pins: 1 A, 2 A, 3 A

## TJA1050
designator U?, comment CAN Transceiver
footprint SOP-8
pins: 1 TX, 2 GND, 3 VCC, 4 RX, 5 VRef, 6 CANL, 7 CANH, 8 VS

## TL431
designator D?
footprint SOT-23
pins: 1 A, 2 K, 3 K

## TLP291
designator U?, comment TLP291-1  (value not drawn)
footprint SOP-4
part A pins: 1 A, 2 K
part B pins: 3 E, 4 C

## TLV62569PDDCR
designator U?
2.5V-5.5V input, 2-A high efficiency step-down buck converter in SOT23 and SOT563 package; MF: Texas Instruments; MP: TLV62569PDDCR; SnapEDA_Link: https://www.snapeda.com/parts/TLV62569PDDCR/Texas+Instruments/view-part/?ref=snap; Package: SOT-23-THN-6 Texas Instruments; Value: *; Check_prices: https://www.snapeda.com/parts/TLV62569PDDCR/Texas+Instruments/view-part/?ref=eda
footprint SOT23-5
pins: 1 EN (power), 2 GND (power), 3 SW (power), 4 VIN (power), 5 FB (power)

## TPA2005D1DGNG4
designator U?
1.4-W Mono Class-D Audio Amplifier (TPA2005) 8-HVSSOP -40 to 85; MP: TPA2005D1DGNG4; MF: Texas Instruments; Purchase-URL: https://pricing.snapeda.com/search/part/TPA2005D1DGNG4/?ref=eda; Value: *; Availability: In Stock; Check_prices: https://www.snapeda.com/parts/TPA2005D1DGNG4/Texas+Instruments/view-part/?ref=eda; SnapEDA_Link: https://www.snapeda.com/parts/TPA2005D1DGNG4/Texas+Instruments/view-part/?ref=snap; Price: None; Package: HVSSOP-8 Texas Instruments
footprint HVSSOP-8
pins: 1 ~{SHDN} (power), 3 IN+ (power), 4 IN- (power), 5 VO+ (power), 6 VDD (power), 7 GND (power), 8 VO- (power), 9 THERMALPAD (power)

## TPS2051CDBVR
designator U?
0.5A loading, 4.5-5.5V, 97mÎ© USB power switch, active-high, output discharge, reverse blocking; MF: Texas Instruments; MP: TPS2051CDBVR; SnapEDA_Link: https://www.snapeda.com/parts/TPS2051CDBVR/Texas+Instruments/view-part/?ref=snap; Package: SOT-23-5 Texas Instruments; Value: *; Check_prices: https://www.snapeda.com/parts/TPS2051CDBVR/Texas+Instruments/view-part/?ref=eda
footprint SOT23-5
pins: 1 OUT (power), 2 GND (power), 3 ~{FLT} (power), 4 EN/~{EN} (power), 5 IN (power)

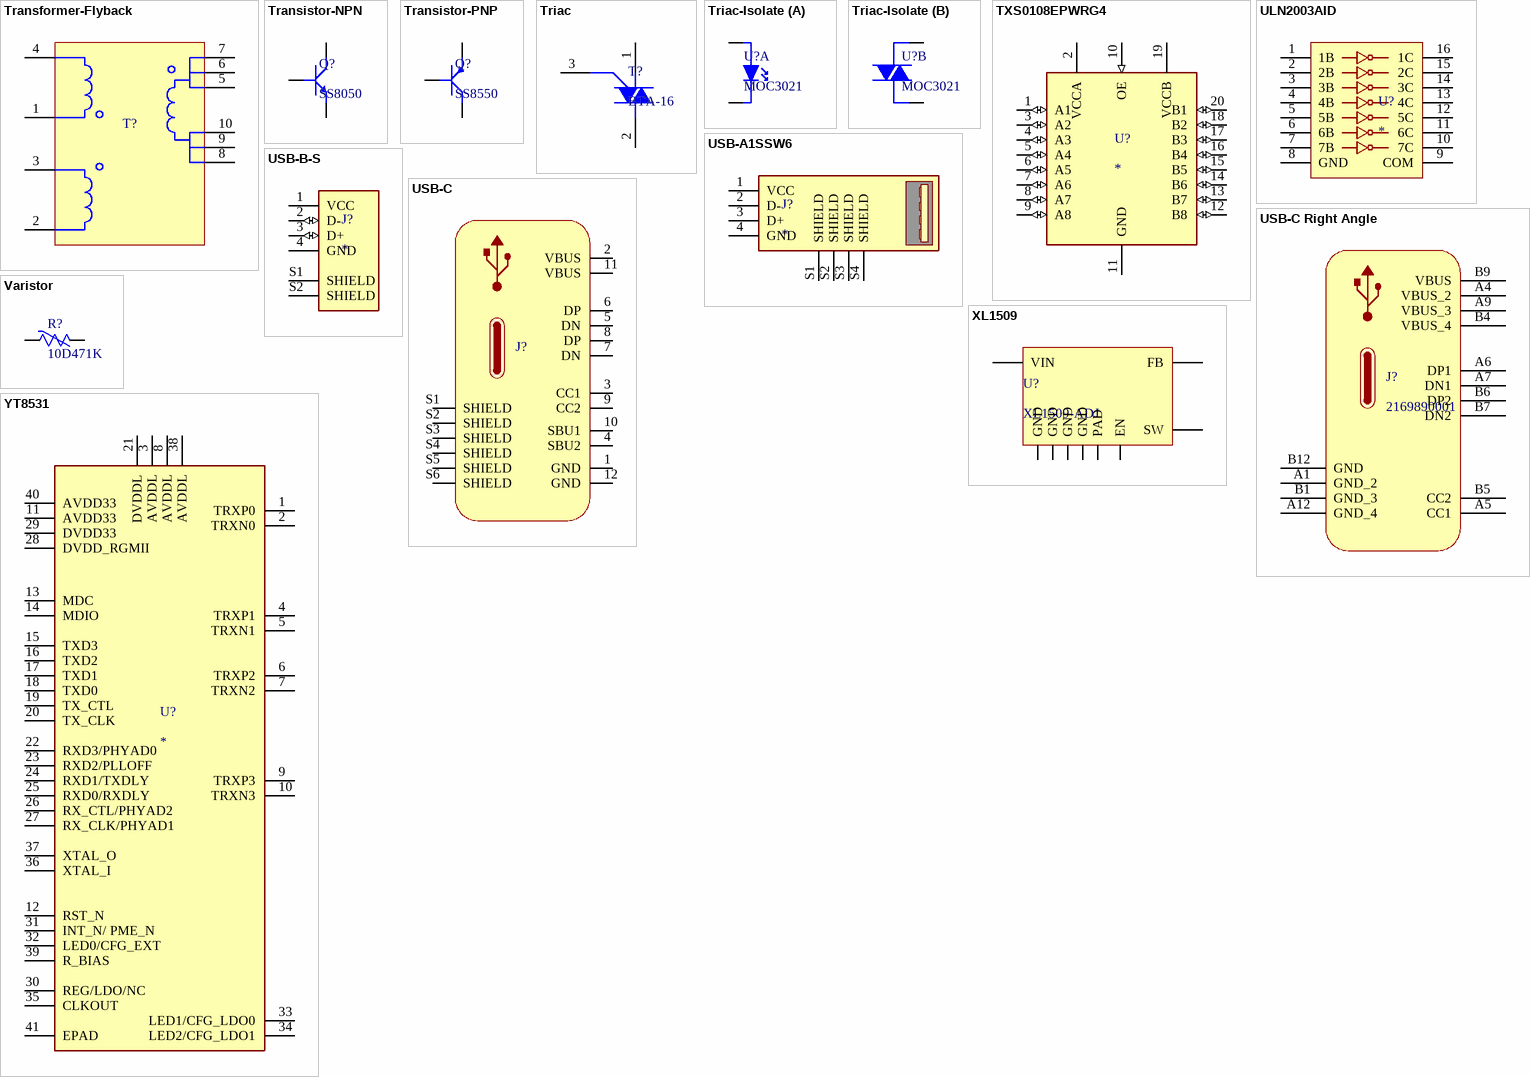
[diagram p3: symbols Transformer-Flyback to YT8531]

## Transformer-Flyback
designator T?
footprint EE.27
pins: 1, 2, 3, 4, 5, 6, 7, 8, 9, 10

## Transistor-NPN
designator Q?, comment SS8050
footprint SOT-23
pins: 1 B, 2 E, 3 C

## Transistor-PNP
designator Q?, comment SS8550
footprint SOT-23
pins: 1 B, 2 E, 3 C

## Triac
designator T?, comment BTA-16
footprint TO-220
pins: 1 A, 2 A, 3 A

## Triac-Isolate
designator U?, comment MOC3021
footprint DIP-6
part A pins: 1 A, 2 K
part B pins: 4, 6

## TXS0108EPWRG4
designator U?
8-bit bidirectional voltage-level shifter for open-drain and push-pull application 20-TSSOP -40 to 85; MP: TXS0108EPWRG4; MF: Texas Instruments; Check_prices: https://www.snapeda.com/parts/TXS0108EPWRG4/Texas+Instruments/view-part/?ref=eda; Value: *; Availability: In Stock; Price: None; Package: TSSOP-20 Texas Instruments; SnapEDA_Link: https://www.snapeda.com/parts/TXS0108EPWRG4/Texas+Instruments/view-part/?ref=snap; Purchase-URL: https://pricing.snapeda.com/search/part/TXS0108EPWRG4/?ref=eda
footprint TSSOP-20
footprint VQFN-20
pins: 1 A1 (io), 2 VCCA (power), 3 A2 (io), 4 A3 (io), 5 A4 (io), 6 A5 (io), 7 A6 (io), 8 A7 (io), 9 A8 (io), 10 OE (in), 11 GND (power), 12 B8 (io), 13 B7 (io), 14 B6 (io), 15 B5 (io), 16 B4 (io), 17 B3 (io), 18 B2 (io), 19 VCCB (power), 20 B1 (io)

## ULN2003AID
designator U?
50-V, 7-ch darlington transistor array, -40 to 105C; MF: Texas Instruments; MP: ULN2003AID; SnapEDA_Link: https://www.snapeda.com/parts/ULN2003AID/Texas+Instruments/view-part/?ref=snap; Package: SOIC-16 Texas Instruments; Value: *; Check_prices: https://www.snapeda.com/parts/ULN2003AID/Texas+Instruments/view-part/?ref=eda
footprint SOIC-16
pins: 1 1B (power), 2 2B (power), 3 3B (power), 4 4B (power), 5 5B (power), 6 6B (power), 7 7B (power), 8 GND (power), 9 COM (power), 10 7C (power), 11 6C (power), 12 5C (power), 13 4C (power), 14 3C (power), 15 2C (power), 16 1C (power)

## USB-A1SSW6
designator J?
USB-A (USB TYPE-A) - Receptacle Connector 4 Position Through Hole, Right Angle; MF: On Shore; MP: USB-A1SSW6; Value: *; SnapEDA_Link: https://www.snapeda.com/parts/USB-A1SSW6/On+Shore+Technology+Inc./view-part/?ref=snap; Purchase-URL: https://pricing.snapeda.com/search/part/USB-A1SSW6/?ref=eda; Availability: In Stock; Price: None; Package: None; Check_prices: https://www.snapeda.com/parts/USB-A1SSW6/On+Shore+Technology+Inc./view-part/?ref=eda
footprint USB-A-Vertical
pins: 1 VCC (power), 2 D- (power), 3 D+ (power), 4 GND (power), S1 SHIELD, S2 SHIELD, S3 SHIELD, S4 SHIELD

## USB-B-S
designator J?
USB-B (USB TYPE-B) USB 2.0 Receptacle Connector 4 Position Through Hole, Right Angle; MF: Samtec; MP: USB-B-S-F-W-TH-TR; SnapEDA_Link: https://www.snapeda.com/parts/USB-B-S-F-W-TH-TR/Samtec/view-part/?ref=snap; Package: None; Value: *; Check_prices: https://www.snapeda.com/parts/USB-B-S-F-W-TH-TR/Samtec/view-part/?ref=eda
footprint SAMTEC_USB-B-S-X-X-TH
pins: 1 VCC (power), 2 D- (io), 3 D+ (io), 4 GND (power), S1 SHIELD, S2 SHIELD

## USB-C
designator J?
USB-C (USB TYPE-C) USB 2.0 Receptacle Connector 24 (16+8 Dummy) Position Surface Mount, Right Angle; Through Hole; MP: DX07S016JA1R1500; Package: None; Value: *; Price: None; Availability: Unavailable
footprint JAE_DX07S016JA1R1500
pins: 1 GND (power), 2 VBUS (power), 3 CC1, 4 SBU2, 5 DN, 6 DP, 7 DN, 8 DP, 9 CC2, 10 SBU1, 11 VBUS (power), 12 GND (power), S1 SHIELD, S2 SHIELD, S3 SHIELD, S4 SHIELD, S5 SHIELD, S6 SHIELD

## USB-C Right Angle
designator J?, comment 2169890001
MF: {'manufacturer': u'Molex'}; Package: None; Price: None; Value: *; MP: 2169890001; Availability: Unavailable
footprint USB-C R/A
pins: A1 GND_2 (power), A4 VBUS_2 (power), A5 CC1 (power), A6 DP1 (power), A7 DN1 (power), A9 VBUS_3 (power), A12 GND_4 (power), B1 GND_3 (power), B4 VBUS_4 (power), B5 CC2 (power), B6 DP2 (power), B7 DN2 (power), B9 VBUS (power), B12 GND (power)

## Varistor
designator R?, comment 10D471K
footprint 10D471
pins: 1, 2

## XL1509
designator U?, comment XL1509-ADJ
BUCK
footprint SOP-8-PAD
pins: 1 VIN, 2 SW, 3 FB, 4 EN, 5 GND, 6 GND, 7 GND, 8 GND, 9 PAD

## YT8531
designator U?
INTEGRATED 10/100/1000 GIGABIT ETHERNET TRANSCEIVER; MF: Texas Instruments; MP: TLK1221RHATG4; SnapEDA_Link: https://www.snapeda.com/parts/TLK1221RHATG4/Texas+Instruments/view-part/?ref=snap; Package: VQFN-40 Texas Instruments; Value: *; Check_prices: https://www.snapeda.com/parts/TLK1221RHATG4/Texas+Instruments/view-part/?ref=eda
footprint QFN-40
pins: 1 TRXP0, 2 TRXN0, 3 AVDDL, 4 TRXP1, 5 TRXN1, 6 TRXP2, 7 TRXN2, 8 AVDDL, 9 TRXP3, 10 TRXN3, 11 AVDD33, 12 RST_N, 13 MDC, 14 MDIO, 15 TXD3, 16 TXD2, 17 TXD1, 18 TXD0, 19 TX_CTL, 20 TX_CLK, 21 DVDDL, 22 RXD3/PHYAD0, 23 RXD2/PLLOFF, 24 RXD1/TXDLY, 25 RXD0/RXDLY, 26 RX_CTL/PHYAD2, 27 RX_CLK/PHYAD1, 28 DVDD_RGMII, 29 DVDD33, 30 REG/LDO/NC, 31 INT_N/ PME_N, 32 LED0/CFG_EXT, 33 LED1/CFG_LDO0, 34 LED2/CFG_LDO1, 35 CLKOUT, 36 XTAL_I, 37 XTAL_O, 38 AVDDL, 39 R_BIAS, 40 AVDD33, 41 EPAD